# Altium footprint library George.PcbLib: 34 footprints (part 3 of 3)
Each footprint in its own frame and in the unit in brackets; x right, y up, seen from the top. Pads: shape width x height; smd on the part's side, far side on the other; paste and mask are expansions set on the pad; w line width, h text height; cw(c..) or ccw(c..) is an arc to the next point about the centre after c.
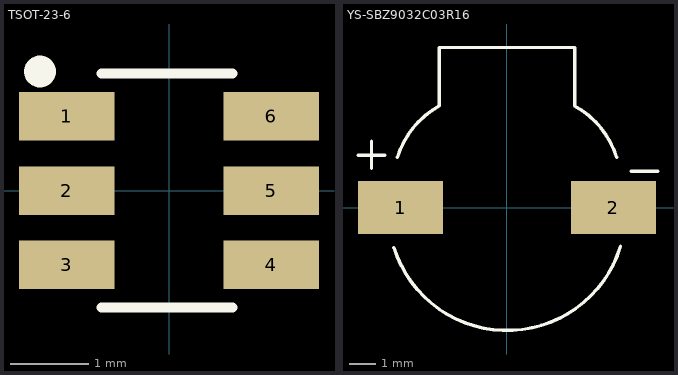
[diagram p2: the footprints below, top view; thin cyan lines are the x and y axes]

## TSOT-23-6 [mm]
pads (6):
  rect 1.22x0.62 smd: 1(-1.31,0.95) 2(-1.31,0) 3(-1.31,-0.95) 4(1.31,-0.95) 5(1.31,0) 6(1.31,0.95)
Top Overlay:
  circle w0.254: c-1.651,1.524 r0.076
  lines w0.127: -0.864,-1.499 0.813,-1.499 ; -0.864,1.499 0.813,1.499
3D body "LTC4412IS6#TRPBF.STEP": height 1, standoff 0, extent -1.4,-1.45 1.4,1.45

## YS-SBZ9032C03R16 [mm] "NO 2700Hz 85dB @ 3V, 10cm 3V F9mm SMD,9x3.2mm Buzzers RoHS"
pads (2):
  rect 3.2x2 smd: 1(-4,0) 2(4,0)
Top Overlay:
  lines w0.127: -5.608,1.975 -4.592,1.975 ; -5.1,1.476 -5.1,2.492 ; -4.255,-1.51 ccw(c0,-0.161) 4.272,-1.455 ; -4.125,1.901 cw(c-0.939,0.9) -2.55,3.825 -2.55,6.025 2.55,6.025 2.55,3.825 cw(c0.939,0.9) 4.125,1.901 ; 4.667,1.37 5.683,1.37
3D body "CUI_DEVICES_CMT-0926-86-SMT-TR.step": height 2.6, standoff 0, extent -5.25,-4.5 5.25,6